# Altium integrated library RC0402FR-0724R9P.IntLib: 1 symbol
Pins are listed as number, name and electrical type; pins without a type are passive.

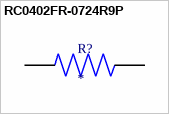
[diagram p0: symbol RC0402FR-0724R9P]

## RC0402FR-0724R9P
designator R?
RES SMD 24.9 OHM 1% 1/16W 0402; MP: RC0402FR-0724R9P; Package: None; Price: None; Value: *; Availability: Unavailable
footprint RESC1005X40N
pins: 1, 2